# Altium footprint library UCP.PcbLib: 222 footprints (part 13 of 14)
Each footprint in its own frame and in the unit in brackets; x right, y up, seen from the top. Pads: shape width x height; smd on the part's side, far side on the other; paste and mask are expansions set on the pad; w line width, h text height; cw(c..) or ccw(c..) is an arc to the next point about the centre after c.
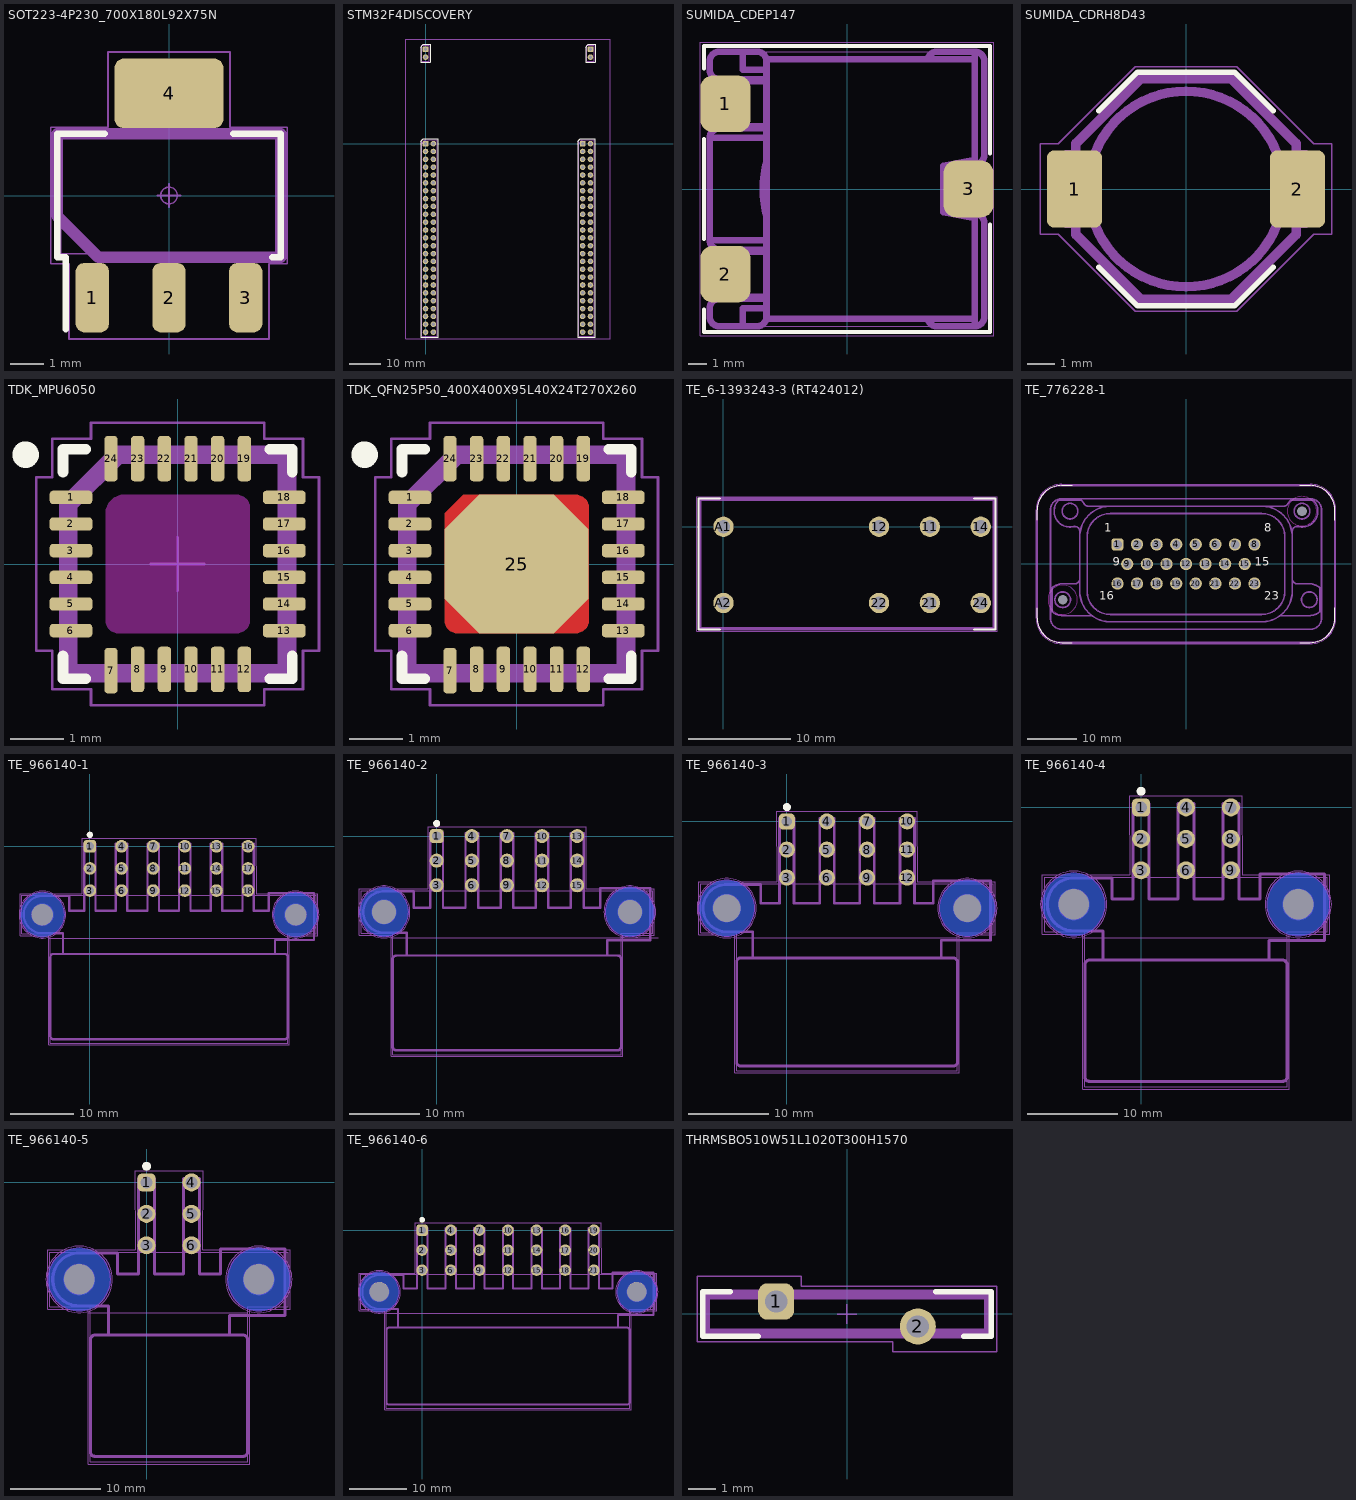
[diagram p12: the footprints below, top view; thin cyan lines are the x and y axes]

## SOT223-4P230_700X180L92X75N [mm] "Small Outline Transistor (SOT223), 2.30 mm pitch; 4 pin, 6.50 mm L X 3.50 mm W X 1.80 mm H body"
height 1.8
pads (4):
  rrect50% 1x2.08 smd: 1(-2.3,-3.065) 2(0,-3.065) 3(2.3,-3.065)
  rrect24% 3.26x2.08 smd: 4(0,3.065)
Top Overlay:
  lines w0.2: -3.1,-4.005 -3.1,-1.85 -3.35,-1.85 -3.35,1.85 -1.93,1.85 ; 1.93,1.85 3.35,1.85 3.35,-1.85 3.1,-1.85
Top Designator:
  text ".Designator" at 0,0 h1.2
Top Assembly:
  lines w0.35: -3.35,-0.617 -3.35,1.85 3.35,1.85 3.35,-1.85 -2.117,-1.85 -3.35,-0.617
Top Courtyard:
  circle w0.05: c0,0 r0.25
  lines w0.05: -0.35,0 0.35,0 ; 0,-0.35 0,0.35 ; -3.55,-2.05 -3,-2.05 -3,-4.305 3,-4.305 3,-2.05 3.55,-2.05 3.55,2.05 1.83,2.05 1.83,4.305 -1.83,4.305 -1.83,2.05 -3.55,2.05 -3.55,-2.05
Top Component Outline:
  lines w0.05: -3.25,-1.75 3.25,-1.75 3.25,1.75 -3.25,1.75 -3.25,-1.75
Top Component Terminal:
  lines w0.05: -2.675,-3.5 -2.675,-2.575 -1.925,-2.575 -1.925,-3.5 -2.675,-3.5 ; -1.5,2.575 -1.5,3.5 1.5,3.5 1.5,2.575 -1.5,2.575 ; -0.375,-3.5 -0.375,-2.575 0.375,-2.575 0.375,-3.5 -0.375,-3.5 ; 1.925,-3.5 1.925,-2.575 2.675,-2.575 2.675,-3.5 1.925,-3.5
3D body "SOT223-4P230_700X180L92X75.STEP": height 1.8, standoff 0, extent -3.25,-3.5 3.25,3.5

## STM32F4DISCOVERY [mm]
pads (104):
  rrect25% 1.8x1.8 hole 1.1 paste-2: JP3.1(0,30.48) JP4.1(53.34,30.48) P1.1(0,0) P2.1(50.8,0)
  round 1.8 hole 1.1 paste-2: JP3.2(0,27.94) JP4.2(53.34,27.94) P1.2(2.54,0) P1.3(0,-2.54) P1.4(2.54,-2.54) P1.5(0,-5.08) P1.6(2.54,-5.08) P1.7(0,-7.62) P1.8(2.54,-7.62) P1.9(0,-10.16) P1.10(2.54,-10.16) P1.11(0,-12.7) P1.12(2.54,-12.7) P1.13(0,-15.24) P1.14(2.54,-15.24) P1.15(0,-17.78) P1.16(2.54,-17.78) P1.17(0,-20.32) P1.18(2.54,-20.32) P1.19(0,-22.86) P1.20(2.54,-22.86) P1.21(0,-25.4) P1.22(2.54,-25.4) P1.23(0,-27.94) P1.24(2.54,-27.94) P1.25(0,-30.48) P1.26(2.54,-30.48) P1.27(0,-33.02) P1.28(2.54,-33.02) P1.29(0,-35.56) P1.30(2.54,-35.56) P1.31(0,-38.1) P1.32(2.54,-38.1) P1.33(0,-40.64) P1.34(2.54,-40.64) P1.35(0,-43.18) P1.36(2.54,-43.18) P1.37(0,-45.72) P1.38(2.54,-45.72) P1.39(0,-48.26) P1.40(2.54,-48.26) P1.41(0,-50.8) P1.42(2.54,-50.8) P1.43(0,-53.34) P1.44(2.54,-53.34) P1.45(0,-55.88) P1.46(2.54,-55.88) P1.47(0,-58.42) P1.48(2.54,-58.42) P1.49(0,-60.96) P1.50(2.54,-60.96) P2.2(53.34,0) P2.3(50.8,-2.54) P2.4(53.34,-2.54) P2.5(50.8,-5.08) P2.6(53.34,-5.08) P2.7(50.8,-7.62) P2.8(53.34,-7.62) P2.9(50.8,-10.16) P2.10(53.34,-10.16) P2.11(50.8,-12.7) P2.12(53.34,-12.7) P2.13(50.8,-15.24) P2.14(53.34,-15.24) P2.15(50.8,-17.78) P2.16(53.34,-17.78) P2.17(50.8,-20.32) P2.18(53.34,-20.32) P2.19(50.8,-22.86) P2.20(53.34,-22.86) P2.21(50.8,-25.4) P2.22(53.34,-25.4) P2.23(50.8,-27.94) P2.24(53.34,-27.94) P2.25(50.8,-30.48) P2.26(53.34,-30.48) P2.27(50.8,-33.02) P2.28(53.34,-33.02) P2.29(50.8,-35.56) P2.30(53.34,-35.56) P2.31(50.8,-38.1) P2.32(53.34,-38.1) P2.33(50.8,-40.64) P2.34(53.34,-40.64) P2.35(50.8,-43.18) P2.36(53.34,-43.18) P2.37(50.8,-45.72) P2.38(53.34,-45.72) P2.39(50.8,-48.26) P2.40(53.34,-48.26) P2.41(50.8,-50.8) P2.42(53.34,-50.8) P2.43(50.8,-53.34) P2.44(53.34,-53.34) P2.45(50.8,-55.88) P2.46(53.34,-55.88) P2.47(50.8,-58.42) P2.48(53.34,-58.42) P2.49(50.8,-60.96) P2.50(53.34,-60.96)
Top Overlay:
  lines w0.2: -1.6,-62.56 4.14,-62.56 4.14,1.6 -0.7,1.6 -1.6,0.7 -1.6,-62.56 ; -1.6,26.34 1.6,26.34 1.6,32.08 -0.7,32.08 -1.6,31.18 -1.6,26.34 ; 49.2,-62.56 54.94,-62.56 54.94,1.6 50.1,1.6 49.2,0.7 49.2,-62.56 ; 51.74,26.34 54.94,26.34 54.94,32.08 52.64,32.08 51.74,31.18 51.74,26.34
Top Designator:
  text ".Designator" at 0,2.54 h1.2
Top Assembly:
  lines w0.35: -6.33,-63.18 -6.33,33.82 59.67,33.82 59.67,-63.18 -6.33,-63.18 ; -1.23,-62.23 -1.23,0 0.04,1.27 3.77,1.27 3.77,-62.23 -1.23,-62.23 ; -1.23,26.67 -1.23,31.75 1.27,31.75 1.27,26.67 -1.23,26.67 ; 49.57,-62.23 54.57,-62.23 54.57,1.27 50.84,1.27 49.57,0 49.57,-62.23 ; 52.11,26.67 52.11,31.75 54.61,31.75 54.61,26.67 52.11,26.67
Top Courtyard:
  circle w0.05: c0,0 r0.25
  lines w0.05: -0.35,0 0.35,0 ; 0,-0.35 0,0.35 ; -6.33,-63.18 59.67,-63.18 59.67,33.82 -6.33,33.82 -6.33,-63.18
Top Component Outline:
  lines w0.05: -1.23,-62.23 -1.23,1.27 3.77,1.27 3.77,-62.23 -1.23,-62.23 ; -1.23,26.67 -1.23,31.75 1.24,31.75 1.24,26.67 -1.23,26.67 ; 49.57,-62.23 49.57,1.27 54.57,1.27 54.57,-62.23 49.57,-62.23 ; 52.11,26.67 52.11,31.75 54.57,31.75 54.57,26.67 52.11,26.67
Top Component Terminal:
  drawing of 416 lines, arcs and shapes, not listed
3D body "STM32F407DISCO.stp": height 14, standoff -3, extent -6.33,-63.18 59.67,33.82

## SUMIDA_CDEP147 [mm]
pads (3):
  rrect50% 2.65x3 smd: 1(-6.425,4.5) 2(-6.425,-4.5) 3(6.425,0.003)
Top Overlay:
  lines w0.2: -7.55,-6.35 -7.55,-7.55 7.55,-7.55 7.55,-1.875 ; -7.55,-2.65 -7.55,2.65 ; -7.55,6.35 -7.55,7.55 7.55,7.55 7.55,1.875
Top Assembly:
  lines w0.35: -6.75,-5.7 -6.75,-5.8 ; -6.75,-3.3 -6.75,-3.2 ; -6.75,3.3 -6.75,3.2 ; -6.75,5.7 -6.75,5.8 ; -4.25,-6.75 cw(c-4.75,-6.75) -4.75,-7.25 -5.5,-7.25 ; -4.25,-6.3 -5.5,-6.3 -5.5,-7.25 ; -4.25,-5.8 -6.75,-5.8 ; -4.25,-5.7 -4.728,-5.7 -5.413,-5.7 -5.735,-5.7 -6.2,-5.7 ; -4.25,-3.3 -4.728,-3.3 -5.413,-3.3 -5.735,-3.3 -6.2,-3.3 ; -4.25,-3.2 -6.75,-3.2 ; -4.25,-2.7 -7.25,-2.7 ; -4.25,2.7 -7.25,2.7 ; -4.25,3.2 -6.75,3.2 ; -4.25,3.3 -4.46,3.3 -5.229,3.3 -5.818,3.3 -6.2,3.3 ; -4.25,5.7 -4.46,5.7 -5.229,5.7 -5.818,5.7 -6.2,5.7 ; -4.25,5.8 -6.75,5.8 ; -4.25,6.3 -5.5,6.3 -5.5,7.25 ; -4.25,6.75 ccw(c-4.75,6.75) -4.75,7.25 -5.5,7.25 ; 4.26,-6.85 ccw(c4.75,-6.75) 4.75,-7.25 6.75,-7.25 ; 4.26,6.85 cw(c4.75,6.75) 4.75,7.25 6.75,7.25 ; 6.75,-1.497 6.75,-1.55 ; 6.75,1.497 6.75,1.55 ; 6.799,-1.302 cw(c6.75,-1.8) 7.25,-1.8 7.25,-6.75 cw(c6.75,-6.75) 6.75,-7.25 ; 6.799,1.302 ccw(c6.75,1.8) 7.25,1.8 7.25,6.75 ccw(c6.75,6.75) 6.75,7.25 ; 6.822,-1.2 7.05,-1.2 7.25,-1.2 7.25,1.2 7.05,1.2 6.822,1.2 ; -7.25,-2.7 ccw(c-6.75,-2.7) -6.75,-3.2 ; -7.25,-2.7 -7.25,2.7 ; -7.25,2.7 cw(c-6.75,2.7) -6.75,3.2 ; -6.75,-5.8 ccw(c-6.75,-6.3) -7.25,-6.3 -7.25,-6.75 ccw(c-6.75,-6.75) -6.75,-7.25 -5.5,-7.25 ; -6.75,5.8 cw(c-6.75,6.3) -7.25,6.3 -7.25,6.75 cw(c-6.75,6.75) -6.75,7.25 -5.5,7.25 ; -6.2,-5.7 -7.05,-5.7 -7.25,-5.7 -7.25,-3.3 -7.05,-3.3 -6.2,-3.3 ; -6.2,-5.7 -6.2,-3.3 ; -6.2,3.3 -6.2,5.7 ; -6.2,3.3 -7.05,3.3 -7.25,3.3 -7.25,5.7 -7.05,5.7 -6.2,5.7 ; -4.25,-1.497 cw(c1.25,0) -4.25,1.497 ; -4.25,-1.497 cw(c1.25,0) -4.25,1.497 ; -4.25,-1.497 cw(c1.25,0) -4.25,1.497 ; -4.25,-1.497 cw(c1.25,0) -4.25,1.497 ; -4.25,-1.497 cw(c1.25,0) -4.25,1.497 ; -4.25,-1.497 cw(c1.25,0) -4.25,1.497 ; -4.25,-1.497 cw(c1.25,0) -4.25,1.497 ; -4.25,-1.497 cw(c1.25,0) -4.25,1.497 ; 6.736,-1.547 ccw(c1.25,0) 6.736,1.547 ; 6.736,-1.547 ccw(c1.25,0) 6.736,1.547 ; 6.736,-1.547 ccw(c1.25,0) 6.736,1.547 ; 6.736,-1.547 ccw(c1.25,0) 6.736,1.547 ; 6.736,-1.547 ccw(c1.25,0) 6.736,1.547 ; 6.736,-1.547 ccw(c1.25,0) 6.736,1.547 ; 6.736,-1.547 ccw(c1.25,0) 6.736,1.547 ; 6.736,-1.547 ccw(c1.25,0) 6.736,1.547 ; 6.736,-1.547 ccw(c1.25,0) 6.736,1.547 ; 6.75,-7.25 6.75,-6.85 ; 6.75,-6.85 6.75,-1.55 ; 6.75,-6.85 -4.25,-6.85 -4.25,6.85 6.75,6.85 ; 6.75,-1.55 5.1,-1.22 5.1,1.22 6.75,1.55 ; 6.75,1.55 6.75,6.85 ; 6.75,6.85 6.75,7.25
Top Courtyard:
  lines w0.05: -7.75,-7.75 -7.75,7.75 7.75,7.75 7.75,-7.75 -7.75,-7.75
Top Component Outline:
  lines w0.025: -7.25,-6.75 ccw(c-6.75,-6.75) -6.75,-7.25 6.75,-7.25 ccw(c6.75,-6.75) 7.25,-6.75 7.25,6.75 ccw(c6.75,6.75) 6.75,7.25 -6.75,7.25 ccw(c-6.75,6.75) -7.25,6.75 ; -7.25,-6.75 -7.25,6.75 ; -7.25,-6.75 -7.25,6.75
3D body "SUMIDA_CDEP147.stp": height 8, standoff 0, extent -7.25,-7.25 7.25,7.25

## SUMIDA_CDRH8D43 [mm]
height 4
pads (2):
  rrect25% 2x2.8 smd: 1(-4.05,0) 2(4.05,0)
Top Overlay:
  lines w0.2: -3.175,-2.836 -1.76,-4.25 1.76,-4.25 3.175,-2.836 ; -3.175,2.836 -1.76,4.25 1.76,4.25 3.175,2.836
Top Assembly:
  circle w0.35: c0,0 r3.554
  lines w0.35: -4.004,-1.25 -4.343,-1.25 -4.343,1.25 -4,1.25 ; 4,1.25 4.343,1.25 4.343,-1.25 4.004,-1.25 ; -4,-1.657 -4,1.657 -1.657,4 1.657,4 4,1.657 4,-1.657 1.657,-4 -1.657,-4 -4,-1.657
Top Courtyard:
  lines w0.05: -5.3,-1.65 -4.643,-1.65 -1.843,-4.45 1.843,-4.45 4.643,-1.65 5.3,-1.65 5.3,1.65 4.643,1.65 1.843,4.45 -1.843,4.45 -4.643,1.65 -5.3,1.65 -5.3,-1.65
Top Component Outline:
  lines w0.025: -4,-1.657 -4,1.657 -1.657,4 1.657,4 4,1.657 4,-1.657 1.657,-4 -1.657,-4 -4,-1.657
Top Component Terminal:
  lines w0.025: -4.343,-1.25 -3.15,-1.25 -3.15,1.25 -4.343,1.25 -4.343,-1.25 ; 3.15,-1.25 4.343,-1.25 4.343,1.25 3.15,1.25 3.15,-1.25
3D body "SUMIDA_CDRH8D43.stp": height 4.5, standoff 0, extent -4.343,-4 4.343,4

## TDK_MPU6050 [mm] "Quad Flat No-Lead (QFN) with Thermal Tab, 0.50 mm pitch;  square, 6 pin X 6 pin, 4.00 mm L X 4.00 mm W X 0.95 mm H body"
height 0.95
pads (24):
  rrect50% 0.8x0.25 smd mask+0.05: 1(-2,1.25) 2(-2,0.75) 3(-2,0.25) 4(-2,-0.25) 5(-2,-0.75) 6(-2,-1.25) 13(2,-1.25) 14(2,-0.75) 15(2,-0.25) 16(2,0.25) 17(2,0.75) 18(2,1.25)
  rrect50% 0.25x0.85 smd mask+0.05: 7(-1.25,-2) 8(-0.75,-1.975) 9(-0.25,-1.975) 10(0.25,-1.975) 11(0.75,-1.975) 12(1.25,-1.975) 19(1.25,1.975) 20(0.75,1.975) 21(0.25,1.975) 22(-0.25,1.975) 23(-0.75,1.975) 24(-1.25,1.975)
Top Overlay:
  circle w0.25: c-2.85,2.05 r0.125
  lines w0.2: -2.15,-1.725 -2.15,-2.15 -1.725,-2.15 ; -2.15,1.725 -2.15,2.15 -1.725,2.15 ; 1.725,-2.15 2.15,-2.15 2.15,-1.725 ; 1.725,2.15 2.15,2.15 2.15,1.725
Keep-Out Layer:
  region: -1,1.3 1.1,1.3 1.15,1.3 1.242,1.262 1.312,1.192 1.35,1.1 1.35,1.05 1.35,-1.05 1.35,-1.1 1.312,-1.192 1.242,-1.262 1.15,-1.3 1.1,-1.3 -1.1,-1.3 -1.15,-1.3 -1.242,-1.262 -1.312,-1.192 -1.35,-1.1 -1.35,-1.05 -1.35,0.95 -1.35,1.02 -1.297,1.148 -1.198,1.247 -1.07,1.3
Top Assembly:
  lines w0.35: -2.05,-2.05 2.05,-2.05 2.05,2.05 -1.125,2.05 -2.05,1.125 -2.05,-2.05
Top Courtyard:
  lines w0.05: -0.5,0 0.5,0 ; 0,-0.5 0,0.5 ; -2.65,-1.625 -2.35,-1.625 -2.35,-2.35 -1.625,-2.35 -1.625,-2.65 1.625,-2.65 1.625,-2.35 2.35,-2.35 2.35,-1.625 2.65,-1.625 2.65,1.625 2.35,1.625 2.35,2.35 1.625,2.35 1.625,2.65 -1.625,2.65 -1.625,2.35 -2.35,2.35 -2.35,1.625 -2.65,1.625 -2.65,-1.625
3D body "QFN50P400X400X95_HS-25N.step": height 0.95, standoff 0, extent -2.051,-2.051 2.051,2.051

## TDK_QFN25P50_400X400X95L40X24T270X260 [mm] "Quad Flat No-Lead (QFN) with Thermal Tab, 0.50 mm pitch;  square, 6 pin X 6 pin, 4.00 mm L X 4.00 mm W X 0.95 mm H body"
height 0.95
pads (25):
  rrect50% 0.8x0.25 smd mask+0.05: 1(-2,1.25) 2(-2,0.75) 3(-2,0.25) 4(-2,-0.25) 5(-2,-0.75) 6(-2,-1.25) 13(2,-1.25) 14(2,-0.75) 15(2,-0.25) 16(2,0.25) 17(2,0.75) 18(2,1.25)
  rrect50% 0.25x0.85 smd mask+0.05: 7(-1.25,-2) 8(-0.75,-1.975) 9(-0.25,-1.975) 10(0.25,-1.975) 11(0.75,-1.975) 12(1.25,-1.975) 19(1.25,1.975) 20(0.75,1.975) 21(0.25,1.975) 22(-0.25,1.975) 23(-0.75,1.975) 24(-1.25,1.975)
  oct 2.7x2.6 smd paste-3 mask+0: 25(0,0)
Top Layer:
  region: -1.35,-1.05 -1.35,0.95 -1,1.3 1.1,1.3 1.15,1.3 1.242,1.262 1.312,1.192 1.35,1.1 1.35,1.05 1.35,-1.05 1.35,-1.1 1.312,-1.192 1.242,-1.262 1.15,-1.3 1.1,-1.3 -1.1,-1.3 -1.15,-1.3 -1.242,-1.262 -1.312,-1.192 -1.35,-1.1
Top Overlay:
  circle w0.25: c-2.85,2.05 r0.125
  lines w0.2: -2.15,-1.725 -2.15,-2.15 -1.725,-2.15 ; -2.15,1.725 -2.15,2.15 -1.725,2.15 ; 1.725,-2.15 2.15,-2.15 2.15,-1.725 ; 1.725,2.15 2.15,2.15 2.15,1.725
Top Assembly:
  lines w0.35: -2.05,-2.05 -2.05,1.125 -1.125,2.05 2.05,2.05 2.05,-2.05 -2.05,-2.05
Top Courtyard:
  lines w0.05: -0.5,0 0.5,0 ; 0,-0.5 0,0.5 ; -2.65,-1.625 -2.65,1.625 -2.35,1.625 -2.35,2.35 -1.625,2.35 -1.625,2.65 1.625,2.65 1.625,2.35 2.35,2.35 2.35,1.625 2.65,1.625 2.65,-1.625 2.35,-1.625 2.35,-2.35 1.625,-2.35 1.625,-2.65 -1.625,-2.65 -1.625,-2.35 -2.35,-2.35 -2.35,-1.625 -2.65,-1.625
3D body "QFN50P400X400X95_HS-25N.step": height 0.95, standoff 0, extent -2.051,-2.051 2.051,2.051

## TE_6-1393243-3 (RT424012) [mm]
pads (8):
  round 2 hole 1.3: 11(20.3,0) 12(15.3,0) 14(25.3,0) 21(20.3,-7.5) 22(15.3,-7.5) 24(25.3,-7.5) A1(0,0) A2(0,-7.5)
Top Overlay:
  lines w0.2: -0.35,-10.125 -2.45,-10.125 -2.45,2.775 -0.35,2.775 ; 24.65,-10.125 26.75,-10.125 26.75,2.775 24.65,2.775
Top Assembly:
  lines w0.35: -2.35,-10.02 -2.35,2.68 26.65,2.68 26.65,-10.02 -2.35,-10.02
Top Courtyard:
  lines w0.05: -2.6,-10.27 -2.6,2.93 26.9,2.93 26.9,-10.27 -2.6,-10.27
Top Component Outline:
  lines w0.025: -2.35,-10.02 26.65,-10.02 26.65,2.68 -2.35,2.68 -2.35,-10.02
Top Component Terminal:
  lines w0.025: -0.25,-8 -0.25,-7 0.25,-7 0.25,-8 -0.25,-8 ; -0.25,-0.5 -0.25,0.5 0.25,0.5 0.25,-0.5 -0.25,-0.5 ; 15.05,-8 15.05,-7 15.55,-7 15.55,-8 15.05,-8 ; 15.05,-0.5 15.05,0.5 15.55,0.5 15.55,-0.5 15.05,-0.5 ; 20.05,-8 20.05,-7 20.55,-7 20.55,-8 20.05,-8 ; 20.05,-0.5 20.05,0.5 20.55,0.5 20.55,-0.5 20.05,-0.5 ; 25.05,-8 25.05,-7 25.55,-7 25.55,-8 25.05,-8 ; 25.05,-0.5 25.05,0.5 25.55,0.5 25.55,-0.5 25.05,-0.5
3D body "TE_6-1393243-3 (RT424012).stp": height 15.8, standoff -3.5, extent -2.35,-10.02 26.65,2.68

## TE_776228-1 [mm]
pads (25):
  rrect50% 2.5x2.5 hole 1.8: 1(-14,4)
  round 2.5 hole 1.8: 2(-10,4) 3(-6,4) 4(-2,4) 5(2,4) 6(6,4) 7(10,4) 8(14,4) 9(-12,0) 10(-8,0) 11(-4,0) 12(0,0) 13(4,0) 14(8,0) 15(12,0) 16(-14,-4) 17(-10,-4) 18(-6,-4) 19(-2,-4) 20(2,-4) 21(6,-4) 22(10,-4) 23(14,-4)
  round 0 hole 2 unplated mask+0.25: MT2(-25.2,-7.3) MT4(23.7,10.8)
Top Layer keep-out:
  circle w0.1: c23.7,10.8 r3
  circle w0.1: c-25.2,-7.3 r3
Top Overlay:
  lines w0.2: -30.4,-8.925 -30.4,-11.05 ccw(c-25.4,-11.05) -25.4,-16.05 -23.275,-16.05 ; -30.4,8.925 -30.4,11.05 cw(c-25.4,11.05) -25.4,16.05 -23.275,16.05 ; 23.275,-16.05 25.4,-16.05 ccw(c25.4,-11.05) 30.4,-11.05 30.4,-8.925 ; 23.275,16.05 25.4,16.05 cw(c25.4,11.05) 30.4,11.05 30.4,8.925
  text "1" at -16.708,6 h3
  text "16" at -17.757,-7.929 h3
  text "23" at 16,-7.929 h3
  text "8" at 16,6 h3
  text "9" at -14.972,-0.965 h3
  text "15" at 14,-0.965 h3
Bottom Overlay:
  text "1" at -16,6 h3
  text "8" at 16.972,6 h3
  text "9" at -14,-0.965 h3
  text "15" at 15.627,-0.965 h3
  text "16" at -16,-7.929 h3
  text "23" at 18.021,-7.929 h3
Top Assembly:
  circle w0.35: c10,-4 r0.65
  circle w0.35: c-4,0 r0.65
  circle w0.35: c-14,-4 r0.65
  circle w0.35: c-6,4 r0.65
  circle w0.35: c-10,4 r0.65
  circle w0.35: c8,0 r0.65
  circle w0.35: c-2,4 r0.65
  circle w0.35: c14,4 r0.65
  circle w0.35: c6,-4 r0.65
  circle w0.35: c-2,-4 r0.65
  circle w0.35: c-14,4 r0.65
  circle w0.35: c4,0 r0.65
  circle w0.35: c10,4 r0.65
  circle w0.35: c14,-4 r0.65
  circle w0.35: c2,4 r0.65
  circle w0.35: c2,-4 r0.65
  circle w0.35: c-10,-4 r0.65
  circle w0.35: c-8,0 r0.65
  circle w0.35: c0,0 r0.65
  circle w0.35: c-12,0 r0.65
  circle w0.35: c6,4 r0.65
  circle w0.35: c12,0 r0.65
  circle w0.35: c-6,-4 r0.65
  circle w0.35: c-23.7,10.8 r1.6
  circle w0.35: c23.7,10.8 r1.6
  circle w0.35: c-25.2,-7.3 r1.6
  circle w0.35: c25.2,-7.3 r1.6
  lines w0.35: -21.7,-3.05 cw(c-22.7,-3.05) -22.7,-4.05 -25.2,-4.05 ccw(c-25.2,-7.3) -27.4,-4.908 -27.4,-9.692 ccw(c-25.2,-7.3) -25.2,-10.55 -19.233,-10.55 ; 19.233,-10.55 25.2,-10.55 ccw(c25.2,-7.3) 27.4,-9.692 27.4,-4.908 ccw(c25.2,-7.3) 25.2,-4.05 22.7,-4.05 cw(c22.7,-3.05) 21.7,-3.05 ; -21.7,5.6 cw(c-15.5,5.6) -15.5,11.8 ; -21.7,5.6 -21.7,-5.6 ccw(c-15.5,-5.6) -15.5,-11.8 15.5,-11.8 ccw(c15.5,-5.6) 21.7,-5.6 21.7,5.6 ; -21.7,5.6 -21.7,6.669 ccw(c-22.7,6.669) -22.935,7.641 cw(c-23.7,10.8) -26.045,13.05 -21.355,13.05 cw(c-23.7,10.8) -20.832,12.329 ccw(c-19.95,12.8) -19.95,11.8 -15.5,11.8 ; -15.5,11.8 -4.5,11.8 -2.7,11.8 2.7,11.8 4.5,11.8 15.5,11.8 ; 15.5,11.8 cw(c15.5,5.6) 21.7,5.6 ; 15.5,11.8 19.95,11.8 ccw(c19.95,12.8) 20.832,12.329 cw(c23.7,10.8) 21.355,13.05 26.045,13.05 cw(c23.7,10.8) 22.935,7.641 ccw(c22.7,6.669) 21.7,6.669 21.7,5.6 ; -30.4,-11.05 ccw(c-25.4,-11.05) -25.4,-16.05 25.4,-16.05 ccw(c25.4,-11.05) 30.4,-11.05 30.4,11.05 ccw(c25.4,11.05) 25.4,16.05 -25.4,16.05 ccw(c-25.4,11.05) -30.4,11.05 -30.4,-11.05 ; -27.7,-11.05 ccw(c-25.4,-11.05) -25.4,-13.35 25.4,-13.35 ccw(c25.4,-11.05) 27.7,-11.05 27.7,11.05 ccw(c25.4,11.05) 25.4,13.35 -25.4,13.35 ccw(c-25.4,11.05) -27.7,11.05 -27.7,-11.05 ; -20.2,-5.6 ccw(c-15.5,-5.6) -15.5,-10.3 15.5,-10.3 ccw(c15.5,-5.6) 20.2,-5.6 20.2,5.6 ccw(c15.5,5.6) 15.5,10.3 -15.5,10.3 ccw(c-15.5,5.6) -20.2,5.6 -20.2,-5.6
  text "1" at -17.389,5.059 h3
  text "23" at 16.089,-7.243 h3
Top Courtyard:
  lines w0.05: -0.5,0 0.5,0 ; 0,-0.5 0,0.5 ; -30.65,-11.05 ccw(c-25.4,-11.05) -25.4,-16.3 25.4,-16.3 ccw(c25.4,-11.05) 30.65,-11.05 30.65,11.05 ccw(c25.4,11.05) 25.4,16.3 -25.4,16.3 ccw(c-25.4,11.05) -30.65,11.05 -30.65,-11.05
Top Component Outline:
  lines w0.025: -30.4,-9.05 -30.4,-11.05 ; -30.4,9.05 -30.4,11.05 ; -23.4,-16.05 -25.4,-16.05 ; -23.4,16.05 -25.4,16.05 ; 23.4,-16.05 25.4,-16.05 ; 23.4,16.05 25.4,16.05 ; 30.4,-9.05 30.4,-11.05 ; 30.4,9.05 30.4,11.05 ; -30.4,-11.05 ccw(c-25.4,-11.05) -25.4,-16.05 ; -30.4,-11.05 ccw(c-25.4,-11.05) -25.4,-16.05 ; -30.4,-11.05 -30.4,11.05 ; -30.4,11.05 cw(c-25.4,11.05) -25.4,16.05 ; -30.4,11.05 cw(c-25.4,11.05) -25.4,16.05 ; -25.4,-16.05 25.4,-16.05 ; -25.4,16.05 25.4,16.05 ; 25.4,-16.05 ccw(c25.4,-11.05) 30.4,-11.05 ; 25.4,-16.05 ccw(c25.4,-11.05) 30.4,-11.05 ; 25.4,16.05 cw(c25.4,11.05) 30.4,11.05 ; 25.4,16.05 cw(c25.4,11.05) 30.4,11.05 ; 30.4,-11.05 30.4,11.05
Top Component Terminal:
  circle w0.025: c10,-4 r0.65
  circle w0.025: c-4,0 r0.65
  circle w0.025: c-14,-4 r0.65
  circle w0.025: c-6,4 r0.65
  circle w0.025: c-10,4 r0.65
  circle w0.025: c8,0 r0.65
  circle w0.025: c-2,4 r0.65
  circle w0.025: c14,4 r0.65
  circle w0.025: c6,-4 r0.65
  circle w0.025: c-2,-4 r0.65
  circle w0.025: c-14,4 r0.65
  circle w0.025: c4,0 r0.65
  circle w0.025: c10,4 r0.65
  circle w0.025: c14,-4 r0.65
  circle w0.025: c2,4 r0.65
  circle w0.025: c2,-4 r0.65
  circle w0.025: c-10,-4 r0.65
  circle w0.025: c-8,0 r0.65
  circle w0.025: c0,0 r0.65
  circle w0.025: c-12,0 r0.65
  circle w0.025: c6,4 r0.65
  circle w0.025: c12,0 r0.65
  circle w0.025: c-6,-4 r0.65
3D body "TE_776228-1.stp": height 34.25, standoff -3.83, extent -30.4,-16.05 30.4,16.05

## TE_966140-1 [mm] "Conn Timer Connector HDR 18 POS 5mm Solder RA Thru-Hole 18 Terminal 1 Port Tray"
height 25.7
pads (20):
  rrect50% 2x2 hole 1.3: 1(0,0)
  round 2 hole 1.3: 2(0,-3.5) 3(0,-7) 4(5,0) 5(5,-3.5) 6(5,-7) 7(10,0) 8(10,-3.5) 9(10,-7) 10(15,0) 11(15,-3.5) 12(15,-7) 13(20,0) 14(20,-3.5) 15(20,-7) 16(25,0) 17(25,-3.5) 18(25,-7)
  round 0 hole 3.4 unplated mask+0.25: MH1(-7.5,-10.8) MH2(32.5,-10.8)
Bottom Layer:
  pour cut-out: 29,-10.8 29,-11.029 29.06,-11.484 29.179,-11.927 29.354,-12.351 29.584,-12.749 29.863,-13.113 30.187,-13.437 30.551,-13.716 30.949,-13.946 31.373,-14.121 31.816,-14.24 32.271,-14.3 32.5,-14.3 32.729,-14.3 33.184,-14.24 33.627,-14.121 34.051,-13.946 34.449,-13.716 34.813,-13.437 35.137,-13.113 35.416,-12.749 35.646,-12.351 35.821,-11.927 35.94,-11.484 36,-11.029 36,-10.8 36,-10.571 35.94,-10.116 35.821,-9.673 35.646,-9.249 35.416,-8.851 35.137,-8.487 34.813,-8.163 34.449,-7.884 34.051,-7.654 33.627,-7.479 33.184,-7.36 32.729,-7.3 32.5,-7.3 32.271,-7.3 31.816,-7.36 31.373,-7.479 30.949,-7.654 30.551,-7.884 30.187,-8.163 29.863,-8.487 29.584,-8.851 29.354,-9.249 29.179,-9.673 29.06,-10.116 29,-10.571
  pour cut-out: -11,-10.8 -11,-11.029 -10.94,-11.484 -10.821,-11.927 -10.646,-12.351 -10.416,-12.749 -10.137,-13.113 -9.813,-13.437 -9.449,-13.716 -9.051,-13.946 -8.627,-14.121 -8.184,-14.24 -7.729,-14.3 -7.5,-14.3 -7.271,-14.3 -6.816,-14.24 -6.373,-14.121 -5.949,-13.946 -5.551,-13.716 -5.187,-13.437 -4.863,-13.113 -4.584,-12.749 -4.354,-12.351 -4.179,-11.927 -4.06,-11.484 -4,-11.029 -4,-10.8 -4,-10.571 -4.06,-10.116 -4.179,-9.673 -4.354,-9.249 -4.584,-8.851 -4.863,-8.487 -5.187,-8.163 -5.551,-7.884 -5.949,-7.654 -6.373,-7.479 -6.816,-7.36 -7.271,-7.3 -7.5,-7.3 -7.729,-7.3 -8.184,-7.36 -8.627,-7.479 -9.051,-7.654 -9.449,-7.884 -9.813,-8.163 -10.137,-8.487 -10.416,-8.851 -10.646,-9.249 -10.821,-9.673 -10.94,-10.116 -11,-10.571
Bottom Layer keep-out:
  circle w0.025: c32.5,-10.8 r3.5
  circle w0.025: c-7.5,-10.8 r3.5
Top Overlay:
  circle w0.5: c0,1.8 r0.25
Top Designator:
  text ".Designator" at -4.511,-0.453 h2
Top Assembly:
  circle w0.35: c-7.5,-10.8 r1.6
  circle w0.35: c32.5,-10.8 r1.6
  lines w0.35: -4.25,-17 29.25,-17 ; -4.25,-17 -5.75,-17 ccw(c-5.75,-17.5) -6.25,-17.5 -6.25,-30 ccw(c-5.75,-30) -5.75,-30.5 5.75,-30.5 19.25,-30.5 30.75,-30.5 ccw(c30.75,-30) 31.25,-30 31.25,-17.5 ccw(c30.75,-17.5) 31.212,-17.309 ccw(c30.75,-17.5) 30.75,-17 29.25,-17 ; -4.25,-17 -4.25,-13.75 -7.5,-13.75 cw(c-7.5,-10.8) -8.615,-13.531 cw(c-7.5,-10.8) -8.615,-8.069 cw(c-7.5,-10.8) -7.5,-7.85 -4.25,-7.85 -3.25,-7.85 -3.25,-10.2 -0.9,-10.2 -0.9,-1.9 -0.9,0.4 0.9,0.4 0.9,-1.9 0.9,-10.2 4.1,-10.2 4.1,-1.9 4.1,0.4 5.9,0.4 5.9,-1.9 5.9,-10.2 9.1,-10.2 9.1,-1.9 9.1,0.4 10.9,0.4 10.9,-1.9 10.9,-10.2 14.1,-10.2 14.1,-1.9 14.1,0.4 15.9,0.4 15.9,-1.9 15.9,-10.2 19.1,-10.2 19.1,-1.9 19.1,0.4 20.9,0.4 20.9,-1.9 20.9,-10.2 24.1,-10.2 24.1,-1.9 24.1,0.4 25.9,0.4 25.9,-1.9 25.9,-10.2 28.25,-10.2 28.25,-7.4 29.25,-7.4 35.4,-7.4 35.4,-14.8 29.25,-14.8 29.25,-17
Top Courtyard:
  lines w0.025: -6.5,-14.5 31.5,-14.5
  lines w0.05: -11,-14.1 -6.5,-14.1 -6.5,-31.35 31.5,-31.35 31.5,-14.1 36,-14.1 36,-7.5 26.25,-7.5 26.2,1.3 -1.3,1.3 -1.25,-7.5 -11,-7.5 -11,-14.1
Bottom Courtyard:
  circle w0.05: c32.5,-10.8 r3.7
  circle w0.05: c-7.5,-10.8 r3.7
Top Component Outline:
  lines w0.05: -10.75,-13.85 -10.75,-7.75 35.75,-7.75 35.75,-13.85 31.25,-13.85 31.25,-31.1 -6.25,-31.1 -6.25,-13.85 -10.75,-13.85
Top Component Terminal:
  lines w0.025: -0.4,-7.4 -0.4,-6.6 ; -0.4,-7.4 0.4,-7.4 ; -0.4,-7.4 -0.4,-6.6 ; -0.4,-7.4 0.4,-7.4 ; -0.4,-6.6 0.4,-6.6 ; -0.4,-6.6 0.4,-6.6 ; -0.4,-3.9 -0.4,-3.1 ; -0.4,-3.9 0.4,-3.9 ; -0.4,-3.9 -0.4,-3.1 ; -0.4,-3.9 0.4,-3.9 ; -0.4,-3.1 0.4,-3.1 ; -0.4,-3.1 0.4,-3.1 ; -0.4,-0.4 -0.4,0.4 ; -0.4,-0.4 0.4,-0.4 ; -0.4,-0.4 -0.4,0.4 ; -0.4,-0.4 0.4,-0.4 ; -0.4,-0.4 -0.4,0.4 ; -0.4,-0.4 0.4,-0.4 ; -0.4,-0.4 -0.4,0.4 ; -0.4,-0.4 0.4,-0.4 ; -0.4,0.4 0.4,0.4 ; -0.4,0.4 0.4,0.4 ; -0.4,0.4 0.4,0.4 ; -0.4,0.4 0.4,0.4 ; 0.4,-7.4 0.4,-6.6 ; 0.4,-7.4 0.4,-6.6 ; 0.4,-3.9 0.4,-3.1 ; 0.4,-3.9 0.4,-3.1 ; 0.4,-0.4 0.4,0.4 ; 0.4,-0.4 0.4,0.4 ; 0.4,-0.4 0.4,0.4 ; 0.4,-0.4 0.4,0.4 ; 4.6,-0.4 4.6,0.4 ; 4.6,-0.4 5.4,-0.4 ; 4.6,-0.4 4.6,0.4 ; 4.6,-0.4 5.4,-0.4 ; 4.6,0.4 5.4,0.4 ; 4.6,0.4 5.4,0.4 ; 5.4,-0.4 5.4,0.4 ; 5.4,-0.4 5.4,0.4 ; 9.6,-0.4 9.6,0.4 ; 9.6,-0.4 10.4,-0.4 ; 9.6,-0.4 9.6,0.4 ; 9.6,-0.4 10.4,-0.4 ; 9.6,0.4 10.4,0.4 ; 9.6,0.4 10.4,0.4 ; 10.4,-0.4 10.4,0.4 ; 10.4,-0.4 10.4,0.4 ; 14.6,-0.4 14.6,0.4 ; 14.6,-0.4 15.4,-0.4 ; 14.6,-0.4 14.6,0.4 ; 14.6,-0.4 15.4,-0.4 ; 14.6,0.4 15.4,0.4 ; 14.6,0.4 15.4,0.4 ; 15.4,-0.4 15.4,0.4 ; 15.4,-0.4 15.4,0.4 ; 19.6,-0.4 19.6,0.4 ; 19.6,-0.4 20.4,-0.4 ; 19.6,-0.4 19.6,0.4 ; 19.6,-0.4 20.4,-0.4 ; 19.6,0.4 20.4,0.4 ; 19.6,0.4 20.4,0.4 ; 20.4,-0.4 20.4,0.4 ; 20.4,-0.4 20.4,0.4 ; 24.6,-0.4 24.6,0.4 ; 24.6,-0.4 25.4,-0.4 ; 24.6,-0.4 24.6,0.4 ; 24.6,-0.4 25.4,-0.4 ; 24.6,0.4 25.4,0.4 ; 24.6,0.4 25.4,0.4 ; 25.4,-0.4 25.4,0.4 ; 25.4,-0.4 25.4,0.4 ; 4.6,-7.4 4.6,-6.6 5.4,-6.6 5.4,-7.4 4.6,-7.4 ; 4.6,-3.9 4.6,-3.1 5.4,-3.1 5.4,-3.9 4.6,-3.9 ; 9.6,-7.4 9.6,-6.6 10.4,-6.6 10.4,-7.4 9.6,-7.4 ; 9.6,-3.9 9.6,-3.1 10.4,-3.1 10.4,-3.9 9.6,-3.9 ; 14.6,-7.4 14.6,-6.6 15.4,-6.6 15.4,-7.4 14.6,-7.4 ; 14.6,-3.9 14.6,-3.1 15.4,-3.1 15.4,-3.9 14.6,-3.9 ; 19.6,-7.4 19.6,-6.6 20.4,-6.6 20.4,-7.4 19.6,-7.4 ; 19.6,-3.9 19.6,-3.1 20.4,-3.1 20.4,-3.9 19.6,-3.9 ; 24.6,-7.4 24.6,-6.6 25.4,-6.6 25.4,-7.4 24.6,-7.4 ; 24.6,-3.9 24.6,-3.1 25.4,-3.1 25.4,-3.9 24.6,-3.9
3D body "966140-1.stp": height 25.7, standoff -3, extent -10.45,-30.5 35.4,0.4

## TE_966140-2 [mm] "Conn Timer Connector HDR 15 POS 5mm Solder RA Thru-Hole 15 Terminal 1 Port Tray"
height 25.7
pads (17):
  rrect50% 2x2 hole 1.3: 1(0,0)
  round 2 hole 1.3: 2(0,-3.5) 3(0,-7) 4(5,0) 5(5,-3.5) 6(5,-7) 7(10,0) 8(10,-3.5) 9(10,-7) 10(15,0) 11(15,-3.5) 12(15,-7) 13(20,0) 14(20,-3.5) 15(20,-7)
  round 0 hole 3.4 unplated mask+0.25: MH1(-7.5,-10.8) MH2(27.5,-10.8)
Bottom Layer:
  pour cut-out: -11,-10.8 -11,-11.029 -10.94,-11.484 -10.821,-11.927 -10.646,-12.351 -10.416,-12.749 -10.137,-13.113 -9.813,-13.437 -9.449,-13.716 -9.051,-13.946 -8.627,-14.121 -8.184,-14.24 -7.729,-14.3 -7.5,-14.3 -7.271,-14.3 -6.816,-14.24 -6.373,-14.121 -5.949,-13.946 -5.551,-13.716 -5.187,-13.437 -4.863,-13.113 -4.584,-12.749 -4.354,-12.351 -4.179,-11.927 -4.06,-11.484 -4,-11.029 -4,-10.8 -4,-10.571 -4.06,-10.116 -4.179,-9.673 -4.354,-9.249 -4.584,-8.851 -4.863,-8.487 -5.187,-8.163 -5.551,-7.884 -5.949,-7.654 -6.373,-7.479 -6.816,-7.36 -7.271,-7.3 -7.5,-7.3 -7.729,-7.3 -8.184,-7.36 -8.627,-7.479 -9.051,-7.654 -9.449,-7.884 -9.813,-8.163 -10.137,-8.487 -10.416,-8.851 -10.646,-9.249 -10.821,-9.673 -10.94,-10.116 -11,-10.571
  pour cut-out: 24,-10.8 24,-11.029 24.06,-11.484 24.179,-11.927 24.354,-12.351 24.584,-12.749 24.863,-13.113 25.187,-13.437 25.551,-13.716 25.949,-13.946 26.373,-14.121 26.816,-14.24 27.271,-14.3 27.5,-14.3 27.729,-14.3 28.184,-14.24 28.627,-14.121 29.051,-13.946 29.449,-13.716 29.813,-13.437 30.137,-13.113 30.416,-12.749 30.646,-12.351 30.821,-11.927 30.94,-11.484 31,-11.029 31,-10.8 31,-10.571 30.94,-10.116 30.821,-9.673 30.646,-9.249 30.416,-8.851 30.137,-8.487 29.813,-8.163 29.449,-7.884 29.051,-7.654 28.627,-7.479 28.184,-7.36 27.729,-7.3 27.5,-7.3 27.271,-7.3 26.816,-7.36 26.373,-7.479 25.949,-7.654 25.551,-7.884 25.187,-8.163 24.863,-8.487 24.584,-8.851 24.354,-9.249 24.179,-9.673 24.06,-10.116 24,-10.571
Bottom Layer keep-out:
  circle w0.025: c-7.5,-10.8 r3.5
  circle w0.025: c27.5,-10.8 r3.5
Top Overlay:
  circle w0.5: c0,1.8 r0.25
Top Designator:
  text ".Designator" at -4.511,-0.453 h2
Top Assembly:
  circle w0.35: c-7.5,-10.8 r1.6
  circle w0.35: c27.5,-10.8 r1.6
  lines w0.35: -4.25,-17 -4.25,-13.75 -7.5,-13.75 cw(c-7.5,-10.8) -8.615,-13.531 cw(c-7.5,-10.8) -8.615,-8.069 cw(c-7.5,-10.8) -7.5,-7.85 -4.25,-7.85 -3.25,-7.85 -3.25,-10.2 -0.9,-10.2 -0.9,-1.9 -0.9,0.4 0.9,0.4 0.9,-1.9 0.9,-10.2 4.1,-10.2 4.1,-1.9 4.1,0.4 5.9,0.4 5.9,-1.9 5.9,-10.2 9.1,-10.2 9.1,-1.9 9.1,0.4 10.9,0.4 10.9,-1.9 10.9,-10.2 14.1,-10.2 14.1,-1.9 14.1,0.4 15.9,0.4 15.9,-1.9 15.9,-10.2 19.1,-10.2 19.1,-1.9 19.1,0.4 20.9,0.4 20.9,-1.9 20.9,-10.2 23.25,-10.2 23.25,-7.4 24.25,-7.4 30.4,-7.4 30.4,-14.8 24.25,-14.8 24.25,-17 ; -4.25,-17 -5.75,-17 ccw(c-5.75,-17.5) -6.25,-17.5 -6.25,-30 ccw(c-5.75,-30) -5.75,-30.5 5.75,-30.5 19.25,-30.5 25.75,-30.5 ccw(c25.75,-30) 26.25,-30 26.25,-17.5 ccw(c25.75,-17.5) 26.212,-17.309 ccw(c25.75,-17.5) 25.75,-17 24.25,-17 ; -4.25,-17 24.25,-17
Top Courtyard:
  lines w0.025: -6.5,-14.5 31.5,-14.5
  lines w0.05: -11,-14.1 -11,-7.5 -1.25,-7.5 -1.3,1.3 21.2,1.3 21.25,-7.5 31,-7.5 31,-14.1 26.5,-14.1 26.5,-31.35 -6.5,-31.35 -6.5,-14.1 -11,-14.1
Bottom Courtyard:
  circle w0.05: c-7.5,-10.8 r3.7
  circle w0.05: c27.5,-10.8 r3.7
Top Component Outline:
  lines w0.05: -10.75,-13.85 -6.25,-13.85 -6.25,-31.1 26.25,-31.1 26.25,-13.85 30.75,-13.85 30.75,-7.75 -10.75,-7.75 -10.75,-13.85
Top Component Terminal:
  lines w0.025: -0.4,-7.4 0.4,-7.4 ; -0.4,-7.4 -0.4,-6.6 ; -0.4,-7.4 0.4,-7.4 ; -0.4,-7.4 -0.4,-6.6 ; -0.4,-6.6 0.4,-6.6 ; -0.4,-6.6 0.4,-6.6 ; -0.4,-3.9 0.4,-3.9 ; -0.4,-3.9 -0.4,-3.1 ; -0.4,-3.9 0.4,-3.9 ; -0.4,-3.9 -0.4,-3.1 ; -0.4,-3.1 0.4,-3.1 ; -0.4,-3.1 0.4,-3.1 ; -0.4,-0.4 0.4,-0.4 ; -0.4,-0.4 -0.4,0.4 ; -0.4,-0.4 0.4,-0.4 ; -0.4,-0.4 -0.4,0.4 ; -0.4,-0.4 0.4,-0.4 ; -0.4,-0.4 -0.4,0.4 ; -0.4,-0.4 0.4,-0.4 ; -0.4,-0.4 -0.4,0.4 ; -0.4,0.4 0.4,0.4 ; -0.4,0.4 0.4,0.4 ; -0.4,0.4 0.4,0.4 ; -0.4,0.4 0.4,0.4 ; 0.4,-7.4 0.4,-6.6 ; 0.4,-7.4 0.4,-6.6 ; 0.4,-3.9 0.4,-3.1 ; 0.4,-3.9 0.4,-3.1 ; 0.4,-0.4 0.4,0.4 ; 0.4,-0.4 0.4,0.4 ; 0.4,-0.4 0.4,0.4 ; 0.4,-0.4 0.4,0.4 ; 4.6,-0.4 5.4,-0.4 ; 4.6,-0.4 4.6,0.4 ; 4.6,-0.4 5.4,-0.4 ; 4.6,-0.4 4.6,0.4 ; 4.6,0.4 5.4,0.4 ; 4.6,0.4 5.4,0.4 ; 5.4,-0.4 5.4,0.4 ; 5.4,-0.4 5.4,0.4 ; 9.6,-0.4 10.4,-0.4 ; 9.6,-0.4 9.6,0.4 ; 9.6,-0.4 10.4,-0.4 ; 9.6,-0.4 9.6,0.4 ; 9.6,0.4 10.4,0.4 ; 9.6,0.4 10.4,0.4 ; 10.4,-0.4 10.4,0.4 ; 10.4,-0.4 10.4,0.4 ; 14.6,-0.4 15.4,-0.4 ; 14.6,-0.4 14.6,0.4 ; 14.6,-0.4 15.4,-0.4 ; 14.6,-0.4 14.6,0.4 ; 14.6,0.4 15.4,0.4 ; 14.6,0.4 15.4,0.4 ; 15.4,-0.4 15.4,0.4 ; 15.4,-0.4 15.4,0.4 ; 19.6,-7.4 20.4,-7.4 ; 19.6,-7.4 19.6,-6.6 ; 19.6,-7.4 20.4,-7.4 ; 19.6,-7.4 19.6,-6.6 ; 19.6,-6.6 20.4,-6.6 ; 19.6,-6.6 20.4,-6.6 ; 19.6,-3.9 20.4,-3.9 ; 19.6,-3.9 19.6,-3.1 ; 19.6,-3.9 20.4,-3.9 ; 19.6,-3.9 19.6,-3.1 ; 19.6,-3.1 20.4,-3.1 ; 19.6,-3.1 20.4,-3.1 ; 19.6,-0.4 20.4,-0.4 ; 19.6,-0.4 19.6,0.4 ; 19.6,-0.4 20.4,-0.4 ; 19.6,-0.4 19.6,0.4 ; 19.6,-0.4 20.4,-0.4 ; 19.6,-0.4 19.6,0.4 ; 19.6,-0.4 20.4,-0.4 ; 19.6,-0.4 19.6,0.4 ; 19.6,0.4 20.4,0.4 ; 19.6,0.4 20.4,0.4 ; 19.6,0.4 20.4,0.4 ; 19.6,0.4 20.4,0.4 ; 20.4,-7.4 20.4,-6.6 ; 20.4,-7.4 20.4,-6.6 ; 20.4,-3.9 20.4,-3.1 ; 20.4,-3.9 20.4,-3.1 ; 20.4,-0.4 20.4,0.4 ; 20.4,-0.4 20.4,0.4 ; 20.4,-0.4 20.4,0.4 ; 20.4,-0.4 20.4,0.4 ; 4.6,-7.4 5.4,-7.4 5.4,-6.6 4.6,-6.6 4.6,-7.4 ; 4.6,-3.9 5.4,-3.9 5.4,-3.1 4.6,-3.1 4.6,-3.9 ; 9.6,-7.4 10.4,-7.4 10.4,-6.6 9.6,-6.6 9.6,-7.4 ; 9.6,-3.9 10.4,-3.9 10.4,-3.1 9.6,-3.1 9.6,-3.9 ; 14.6,-7.4 15.4,-7.4 15.4,-6.6 14.6,-6.6 14.6,-7.4 ; 14.6,-3.9 15.4,-3.9 15.4,-3.1 14.6,-3.1 14.6,-3.9
3D body "TE_966140-2.stp": height 25.7, standoff -3, extent -10.45,-30.5 30.4,0.4

## TE_966140-3 [mm] "Conn Timer Connector HDR 12 POS 5mm Solder RA Thru-Hole 12 Terminal 1 Port Tray"
height 25.7
pads (14):
  rrect50% 2x2 hole 1.3: 1(0,0)
  round 2 hole 1.3: 2(0,-3.5) 3(0,-7) 4(5,0) 5(5,-3.5) 6(5,-7) 7(10,0) 8(10,-3.5) 9(10,-7) 10(15,0) 11(15,-3.5) 12(15,-7)
  round 0 hole 3.4 unplated mask+0.25: MH1(-7.5,-10.8) MH2(22.5,-10.8)
Bottom Layer:
  pour cut-out: -11,-10.8 -11,-11.029 -10.94,-11.484 -10.821,-11.927 -10.646,-12.351 -10.416,-12.749 -10.137,-13.113 -9.813,-13.437 -9.449,-13.716 -9.051,-13.946 -8.627,-14.121 -8.184,-14.24 -7.729,-14.3 -7.5,-14.3 -7.271,-14.3 -6.816,-14.24 -6.373,-14.121 -5.949,-13.946 -5.551,-13.716 -5.187,-13.437 -4.863,-13.113 -4.584,-12.749 -4.354,-12.351 -4.179,-11.927 -4.06,-11.484 -4,-11.029 -4,-10.8 -4,-10.571 -4.06,-10.116 -4.179,-9.673 -4.354,-9.249 -4.584,-8.851 -4.863,-8.487 -5.187,-8.163 -5.551,-7.884 -5.949,-7.654 -6.373,-7.479 -6.816,-7.36 -7.271,-7.3 -7.5,-7.3 -7.729,-7.3 -8.184,-7.36 -8.627,-7.479 -9.051,-7.654 -9.449,-7.884 -9.813,-8.163 -10.137,-8.487 -10.416,-8.851 -10.646,-9.249 -10.821,-9.673 -10.94,-10.116 -11,-10.571
  pour cut-out: 19,-10.8 19,-11.029 19.06,-11.484 19.179,-11.927 19.354,-12.351 19.584,-12.749 19.863,-13.113 20.187,-13.437 20.551,-13.716 20.949,-13.946 21.373,-14.121 21.816,-14.24 22.271,-14.3 22.5,-14.3 22.729,-14.3 23.184,-14.24 23.627,-14.121 24.051,-13.946 24.449,-13.716 24.813,-13.437 25.137,-13.113 25.416,-12.749 25.646,-12.351 25.821,-11.927 25.94,-11.484 26,-11.029 26,-10.8 26,-10.571 25.94,-10.116 25.821,-9.673 25.646,-9.249 25.416,-8.851 25.137,-8.487 24.813,-8.163 24.449,-7.884 24.051,-7.654 23.627,-7.479 23.184,-7.36 22.729,-7.3 22.5,-7.3 22.271,-7.3 21.816,-7.36 21.373,-7.479 20.949,-7.654 20.551,-7.884 20.187,-8.163 19.863,-8.487 19.584,-8.851 19.354,-9.249 19.179,-9.673 19.06,-10.116 19,-10.571
Bottom Layer keep-out:
  circle w0.025: c-7.5,-10.8 r3.5
  circle w0.025: c22.5,-10.8 r3.5
Top Overlay:
  circle w0.5: c0,1.8 r0.25
Top Designator:
  text ".Designator" at -4.511,-0.453 h2
Top Assembly:
  circle w0.35: c-7.5,-10.8 r1.6
  circle w0.35: c22.5,-10.8 r1.6
  lines w0.35: 14.25,-30.5 20.75,-30.5 ccw(c20.75,-30) 21.25,-30 21.25,-17.5 ccw(c20.75,-17.5) 21.212,-17.309 ccw(c20.75,-17.5) 20.75,-17 19.25,-17 ; 19.25,-30.5 5.75,-30.5 -5.75,-30.5 cw(c-5.75,-30) -6.25,-30 -6.25,-17.5 cw(c-5.75,-17.5) -5.75,-17 -4.25,-17 ; -4.25,-17 -4.25,-13.75 -7.5,-13.75 cw(c-7.5,-10.8) -8.615,-13.531 cw(c-7.5,-10.8) -8.615,-8.069 cw(c-7.5,-10.8) -7.5,-7.85 -4.25,-7.85 -3.25,-7.85 -3.25,-10.2 -0.9,-10.2 -0.9,-1.9 -0.9,0.4 0.9,0.4 0.9,-1.9 0.9,-10.2 4.1,-10.2 4.1,-1.9 4.1,0.4 5.9,0.4 5.9,-1.9 5.9,-10.2 9.1,-10.2 9.1,-1.9 9.1,0.4 10.9,0.4 10.9,-1.9 10.9,-10.2 14.1,-10.2 14.1,-1.9 14.1,0.4 15.9,0.4 15.9,-1.9 15.9,-10.2 18.25,-10.2 18.25,-7.4 19.25,-7.4 25.4,-7.4 25.4,-14.8 19.25,-14.8 19.25,-17 ; -4.25,-17 19.25,-17
Top Courtyard:
  lines w0.025: -6.5,-14.5 21.25,-14.5
  lines w0.05: -11,-14.1 -11,-7.5 -1.25,-7.5 -1.3,1.3 16.2,1.3 16.25,-7.5 26,-7.5 26,-14.1 21.5,-14.1 21.5,-31.35 -6.5,-31.35 -6.5,-14.1 -11,-14.1
Bottom Courtyard:
  circle w0.05: c-7.5,-10.8 r3.7
  circle w0.05: c22.5,-10.8 r3.7
Top Component Outline:
  lines w0.05: -10.75,-13.85 -6.25,-13.85 -6.25,-31.1 21.25,-31.1 21.25,-13.85 25.75,-13.85 25.75,-7.75 -10.75,-7.75 -10.75,-13.85
Top Component Terminal:
  lines w0.025: -0.4,-7.4 0.4,-7.4 ; -0.4,-7.4 -0.4,-6.6 ; -0.4,-7.4 0.4,-7.4 ; -0.4,-7.4 -0.4,-6.6 ; -0.4,-6.6 0.4,-6.6 ; -0.4,-6.6 0.4,-6.6 ; -0.4,-3.9 0.4,-3.9 ; -0.4,-3.9 -0.4,-3.1 ; -0.4,-3.9 0.4,-3.9 ; -0.4,-3.9 -0.4,-3.1 ; -0.4,-3.1 0.4,-3.1 ; -0.4,-3.1 0.4,-3.1 ; -0.4,-0.4 0.4,-0.4 ; -0.4,-0.4 -0.4,0.4 ; -0.4,-0.4 0.4,-0.4 ; -0.4,-0.4 -0.4,0.4 ; -0.4,-0.4 0.4,-0.4 ; -0.4,-0.4 -0.4,0.4 ; -0.4,-0.4 0.4,-0.4 ; -0.4,-0.4 -0.4,0.4 ; -0.4,0.4 0.4,0.4 ; -0.4,0.4 0.4,0.4 ; -0.4,0.4 0.4,0.4 ; -0.4,0.4 0.4,0.4 ; 0.4,-7.4 0.4,-6.6 ; 0.4,-7.4 0.4,-6.6 ; 0.4,-3.9 0.4,-3.1 ; 0.4,-3.9 0.4,-3.1 ; 0.4,-0.4 0.4,0.4 ; 0.4,-0.4 0.4,0.4 ; 0.4,-0.4 0.4,0.4 ; 0.4,-0.4 0.4,0.4 ; 4.6,-0.4 5.4,-0.4 ; 4.6,-0.4 4.6,0.4 ; 4.6,-0.4 5.4,-0.4 ; 4.6,-0.4 4.6,0.4 ; 4.6,0.4 5.4,0.4 ; 4.6,0.4 5.4,0.4 ; 5.4,-0.4 5.4,0.4 ; 5.4,-0.4 5.4,0.4 ; 9.6,-0.4 10.4,-0.4 ; 9.6,-0.4 9.6,0.4 ; 9.6,-0.4 10.4,-0.4 ; 9.6,-0.4 9.6,0.4 ; 9.6,0.4 10.4,0.4 ; 9.6,0.4 10.4,0.4 ; 10.4,-0.4 10.4,0.4 ; 10.4,-0.4 10.4,0.4 ; 14.6,-0.4 15.4,-0.4 ; 14.6,-0.4 14.6,0.4 ; 14.6,-0.4 15.4,-0.4 ; 14.6,-0.4 14.6,0.4 ; 14.6,0.4 15.4,0.4 ; 14.6,0.4 15.4,0.4 ; 15.4,-0.4 15.4,0.4 ; 15.4,-0.4 15.4,0.4 ; 4.6,-7.4 5.4,-7.4 5.4,-6.6 4.6,-6.6 4.6,-7.4 ; 4.6,-3.9 5.4,-3.9 5.4,-3.1 4.6,-3.1 4.6,-3.9 ; 9.6,-7.4 10.4,-7.4 10.4,-6.6 9.6,-6.6 9.6,-7.4 ; 9.6,-3.9 10.4,-3.9 10.4,-3.1 9.6,-3.1 9.6,-3.9 ; 14.6,-7.4 15.4,-7.4 15.4,-6.6 14.6,-6.6 14.6,-7.4 ; 14.6,-3.9 15.4,-3.9 15.4,-3.1 14.6,-3.1 14.6,-3.9
3D body "TE_966140-3.stp": height 25.7, standoff -3, extent -10.45,-30.5 25.4,0.4

## TE_966140-4 [mm] "Conn Timer Connector HDR 9 POS 5mm Solder RA Thru-Hole 9 Terminal 1 Port Tray"
height 25.7
pads (11):
  rrect50% 2x2 hole 1.3: 1(0,0)
  round 2 hole 1.3: 2(0,-3.5) 3(0,-7) 4(5,0) 5(5,-3.5) 6(5,-7) 7(10,0) 8(10,-3.5) 9(10,-7)
  round 0 hole 3.4 unplated mask+0.25: MH1(-7.5,-10.8) MH2(17.5,-10.8)
Bottom Layer:
  pour cut-out: 14,-10.8 14,-11.029 14.06,-11.484 14.179,-11.927 14.354,-12.351 14.584,-12.749 14.863,-13.113 15.187,-13.437 15.551,-13.716 15.949,-13.946 16.373,-14.121 16.816,-14.24 17.271,-14.3 17.5,-14.3 17.729,-14.3 18.184,-14.24 18.627,-14.121 19.051,-13.946 19.449,-13.716 19.813,-13.437 20.137,-13.113 20.416,-12.749 20.646,-12.351 20.821,-11.927 20.94,-11.484 21,-11.029 21,-10.8 21,-10.571 20.94,-10.116 20.821,-9.673 20.646,-9.249 20.416,-8.851 20.137,-8.487 19.813,-8.163 19.449,-7.884 19.051,-7.654 18.627,-7.479 18.184,-7.36 17.729,-7.3 17.5,-7.3 17.271,-7.3 16.816,-7.36 16.373,-7.479 15.949,-7.654 15.551,-7.884 15.187,-8.163 14.863,-8.487 14.584,-8.851 14.354,-9.249 14.179,-9.673 14.06,-10.116 14,-10.571
  pour cut-out: -11,-10.8 -11,-11.029 -10.94,-11.484 -10.821,-11.927 -10.646,-12.351 -10.416,-12.749 -10.137,-13.113 -9.813,-13.437 -9.449,-13.716 -9.051,-13.946 -8.627,-14.121 -8.184,-14.24 -7.729,-14.3 -7.5,-14.3 -7.271,-14.3 -6.816,-14.24 -6.373,-14.121 -5.949,-13.946 -5.551,-13.716 -5.187,-13.437 -4.863,-13.113 -4.584,-12.749 -4.354,-12.351 -4.179,-11.927 -4.06,-11.484 -4,-11.029 -4,-10.8 -4,-10.571 -4.06,-10.116 -4.179,-9.673 -4.354,-9.249 -4.584,-8.851 -4.863,-8.487 -5.187,-8.163 -5.551,-7.884 -5.949,-7.654 -6.373,-7.479 -6.816,-7.36 -7.271,-7.3 -7.5,-7.3 -7.729,-7.3 -8.184,-7.36 -8.627,-7.479 -9.051,-7.654 -9.449,-7.884 -9.813,-8.163 -10.137,-8.487 -10.416,-8.851 -10.646,-9.249 -10.821,-9.673 -10.94,-10.116 -11,-10.571
Bottom Layer keep-out:
  circle w0.025: c17.5,-10.8 r3.5
  circle w0.025: c-7.5,-10.8 r3.5
Top Overlay:
  circle w0.5: c0,1.8 r0.25
Top Designator:
  text ".Designator" at -4.511,-0.453 h2
Top Assembly:
  circle w0.35: c17.5,-10.8 r1.6
  circle w0.35: c-7.5,-10.8 r1.6
  lines w0.35: -4.25,-17 14.25,-17 ; -4.25,-17 -4.25,-13.75 -7.5,-13.75 cw(c-7.5,-10.8) -8.615,-13.531 cw(c-7.5,-10.8) -8.615,-8.069 cw(c-7.5,-10.8) -7.5,-7.85 -4.25,-7.85 -3.25,-7.85 -3.25,-10.2 -0.9,-10.2 -0.9,-1.9 -0.9,0.4 0.9,0.4 0.9,-1.9 0.9,-10.2 4.1,-10.2 4.1,-1.9 4.1,0.4 5.9,0.4 5.9,-1.9 5.9,-10.2 9.1,-10.2 9.1,-1.9 9.1,0.4 10.9,0.4 10.9,-1.9 10.9,-10.2 13.25,-10.2 13.25,-7.4 14.25,-7.4 20.4,-7.4 20.4,-14.8 14.25,-14.8 14.25,-17 ; -4.25,-17 -5.75,-17 ccw(c-5.75,-17.5) -6.25,-17.5 -6.25,-30 ccw(c-5.75,-30) -5.75,-30.5 5.75,-30.5 9.25,-30.5 15.75,-30.5 ccw(c15.75,-30) 16.25,-30 16.25,-17.5 ccw(c15.75,-17.5) 16.212,-17.309 ccw(c15.75,-17.5) 15.75,-17 14.25,-17
Top Courtyard:
  lines w0.025: -6.5,-14.5 16.25,-14.5
  lines w0.05: -11,-14.1 -11,-7.5 -1.25,-7.5 -1.3,1.3 11.2,1.3 11.25,-7.5 21,-7.5 21,-14.1 16.5,-14.1 16.5,-31.35 -6.5,-31.35 -6.5,-14.1 -11,-14.1
Bottom Courtyard:
  circle w0.05: c17.5,-10.8 r3.7
  circle w0.05: c-7.5,-10.8 r3.7
Top Component Outline:
  lines w0.05: -10.75,-13.85 -6.25,-13.85 -6.25,-31.1 16.25,-31.1 16.25,-13.85 20.75,-13.85 20.75,-7.75 -10.75,-7.75 -10.75,-13.85
Top Component Terminal:
  lines w0.025: -0.4,-7.4 0.4,-7.4 ; -0.4,-7.4 -0.4,-6.6 ; -0.4,-7.4 0.4,-7.4 ; -0.4,-7.4 -0.4,-6.6 ; -0.4,-6.6 0.4,-6.6 ; -0.4,-6.6 0.4,-6.6 ; -0.4,-3.9 0.4,-3.9 ; -0.4,-3.9 -0.4,-3.1 ; -0.4,-3.9 0.4,-3.9 ; -0.4,-3.9 -0.4,-3.1 ; -0.4,-3.1 0.4,-3.1 ; -0.4,-3.1 0.4,-3.1 ; -0.4,-0.4 0.4,-0.4 ; -0.4,-0.4 -0.4,0.4 ; -0.4,-0.4 0.4,-0.4 ; -0.4,-0.4 -0.4,0.4 ; -0.4,-0.4 0.4,-0.4 ; -0.4,-0.4 -0.4,0.4 ; -0.4,-0.4 0.4,-0.4 ; -0.4,-0.4 -0.4,0.4 ; -0.4,0.4 0.4,0.4 ; -0.4,0.4 0.4,0.4 ; -0.4,0.4 0.4,0.4 ; -0.4,0.4 0.4,0.4 ; 0.4,-7.4 0.4,-6.6 ; 0.4,-7.4 0.4,-6.6 ; 0.4,-3.9 0.4,-3.1 ; 0.4,-3.9 0.4,-3.1 ; 0.4,-0.4 0.4,0.4 ; 0.4,-0.4 0.4,0.4 ; 0.4,-0.4 0.4,0.4 ; 0.4,-0.4 0.4,0.4 ; 4.6,-0.4 5.4,-0.4 ; 4.6,-0.4 4.6,0.4 ; 4.6,-0.4 5.4,-0.4 ; 4.6,-0.4 4.6,0.4 ; 4.6,0.4 5.4,0.4 ; 4.6,0.4 5.4,0.4 ; 5.4,-0.4 5.4,0.4 ; 5.4,-0.4 5.4,0.4 ; 9.6,-0.4 10.4,-0.4 ; 9.6,-0.4 9.6,0.4 ; 9.6,-0.4 10.4,-0.4 ; 9.6,-0.4 9.6,0.4 ; 9.6,0.4 10.4,0.4 ; 9.6,0.4 10.4,0.4 ; 10.4,-0.4 10.4,0.4 ; 10.4,-0.4 10.4,0.4 ; 4.6,-7.4 5.4,-7.4 5.4,-6.6 4.6,-6.6 4.6,-7.4 ; 4.6,-3.9 5.4,-3.9 5.4,-3.1 4.6,-3.1 4.6,-3.9 ; 9.6,-7.4 10.4,-7.4 10.4,-6.6 9.6,-6.6 9.6,-7.4 ; 9.6,-3.9 10.4,-3.9 10.4,-3.1 9.6,-3.1 9.6,-3.9
3D body "TE_966140-4.stp": height 25.7, standoff -3, extent -10.45,-30.5 20.4,0.4

## TE_966140-5 [mm] "Conn Timer Connector HDR 6 POS 5mm Solder RA Thru-Hole 6 Terminal 1 Port Tray"
height 25.7
pads (8):
  rrect50% 2x2 hole 1.3: 1(0,0)
  round 2 hole 1.3: 2(0,-3.5) 3(0,-7) 4(5,0) 5(5,-3.5) 6(5,-7)
  round 0 hole 3.4 unplated mask+0.25: MH1(-7.5,-10.8) MH2(12.5,-10.8)
Bottom Layer:
  pour cut-out: -11,-10.8 -11,-11.029 -10.94,-11.484 -10.821,-11.927 -10.646,-12.351 -10.416,-12.749 -10.137,-13.113 -9.813,-13.437 -9.449,-13.716 -9.051,-13.946 -8.627,-14.121 -8.184,-14.24 -7.729,-14.3 -7.5,-14.3 -7.271,-14.3 -6.816,-14.24 -6.373,-14.121 -5.949,-13.946 -5.551,-13.716 -5.187,-13.437 -4.863,-13.113 -4.584,-12.749 -4.354,-12.351 -4.179,-11.927 -4.06,-11.484 -4,-11.029 -4,-10.8 -4,-10.571 -4.06,-10.116 -4.179,-9.673 -4.354,-9.249 -4.584,-8.851 -4.863,-8.487 -5.187,-8.163 -5.551,-7.884 -5.949,-7.654 -6.373,-7.479 -6.816,-7.36 -7.271,-7.3 -7.5,-7.3 -7.729,-7.3 -8.184,-7.36 -8.627,-7.479 -9.051,-7.654 -9.449,-7.884 -9.813,-8.163 -10.137,-8.487 -10.416,-8.851 -10.646,-9.249 -10.821,-9.673 -10.94,-10.116 -11,-10.571
  pour cut-out: 9,-10.8 9,-11.029 9.06,-11.484 9.179,-11.927 9.354,-12.351 9.584,-12.749 9.863,-13.113 10.187,-13.437 10.551,-13.716 10.949,-13.946 11.373,-14.121 11.816,-14.24 12.271,-14.3 12.5,-14.3 12.729,-14.3 13.184,-14.24 13.627,-14.121 14.051,-13.946 14.449,-13.716 14.813,-13.437 15.137,-13.113 15.416,-12.749 15.646,-12.351 15.821,-11.927 15.94,-11.484 16,-11.029 16,-10.8 16,-10.571 15.94,-10.116 15.821,-9.673 15.646,-9.249 15.416,-8.851 15.137,-8.487 14.813,-8.163 14.449,-7.884 14.051,-7.654 13.627,-7.479 13.184,-7.36 12.729,-7.3 12.5,-7.3 12.271,-7.3 11.816,-7.36 11.373,-7.479 10.949,-7.654 10.551,-7.884 10.187,-8.163 9.863,-8.487 9.584,-8.851 9.354,-9.249 9.179,-9.673 9.06,-10.116 9,-10.571
Bottom Layer keep-out:
  circle w0.025: c-7.5,-10.8 r3.5
  circle w0.025: c12.5,-10.8 r3.5
Top Overlay:
  circle w0.5: c0,1.8 r0.25
Top Designator:
  text ".Designator" at -4.511,-0.453 h2
Top Assembly:
  circle w0.35: c-7.5,-10.8 r1.6
  circle w0.35: c12.5,-10.8 r1.6
  lines w0.35: -4.25,-17 -5.75,-17 ccw(c-5.75,-17.5) -6.247,-17.449 ccw(c-5.75,-17.5) -6.25,-17.5 -6.25,-30 ccw(c-5.75,-30) -5.75,-30.5 -4.25,-30.5 9.25,-30.5 10.75,-30.5 ccw(c10.75,-30) 11.25,-30 11.25,-17.5 ccw(c10.75,-17.5) 10.75,-17 9.25,-17 ; -4.25,-17 9.25,-17 ; -4.25,-17 -4.25,-13.75 -7.5,-13.75 cw(c-7.5,-10.8) -8.615,-13.531 cw(c-7.5,-10.8) -8.615,-8.069 cw(c-7.5,-10.8) -7.5,-7.85 -4.25,-7.85 -3.25,-7.85 -3.25,-10.2 -0.9,-10.2 -0.9,-1.9 -0.9,0.4 0.9,0.4 0.9,-1.9 0.9,-10.2 4.1,-10.2 4.1,-1.9 4.1,0.4 5.9,0.4 5.9,-1.9 5.9,-10.2 8.25,-10.2 8.25,-7.4 9.25,-7.4 15.4,-7.4 15.4,-14.8 9.25,-14.8 9.25,-17
Top Courtyard:
  lines w0.025: -6.5,-14.5 11.25,-14.5
  lines w0.05: -11,-14.1 -6.5,-14.1 -6.5,-31.35 11.5,-31.35 11.5,-14.1 16,-14.1 16,-7.5 6.25,-7.5 6.3,1.3 -1.3,1.3 -1.25,-7.5 -11,-7.5 -11,-14.1
Bottom Courtyard:
  circle w0.05: c-7.5,-10.8 r3.7
  circle w0.05: c12.5,-10.8 r3.7
Top Component Outline:
  lines w0.05: -10.75,-13.85 -10.75,-7.75 15.75,-7.75 15.75,-13.85 11.25,-13.85 11.25,-31.1 -6.25,-31.1 -6.25,-13.85 -10.75,-13.85
Top Component Terminal:
  lines w0.025: -0.4,-7.4 -0.4,-6.6 ; -0.4,-7.4 0.4,-7.4 ; -0.4,-7.4 -0.4,-6.6 ; -0.4,-7.4 0.4,-7.4 ; -0.4,-6.6 0.4,-6.6 ; -0.4,-6.6 0.4,-6.6 ; -0.4,-3.9 -0.4,-3.1 ; -0.4,-3.9 0.4,-3.9 ; -0.4,-3.9 -0.4,-3.1 ; -0.4,-3.9 0.4,-3.9 ; -0.4,-3.1 0.4,-3.1 ; -0.4,-3.1 0.4,-3.1 ; -0.4,-0.4 -0.4,0.4 ; -0.4,-0.4 0.4,-0.4 ; -0.4,-0.4 -0.4,0.4 ; -0.4,-0.4 0.4,-0.4 ; -0.4,-0.4 -0.4,0.4 ; -0.4,-0.4 0.4,-0.4 ; -0.4,-0.4 -0.4,0.4 ; -0.4,-0.4 0.4,-0.4 ; -0.4,0.4 0.4,0.4 ; -0.4,0.4 0.4,0.4 ; -0.4,0.4 0.4,0.4 ; -0.4,0.4 0.4,0.4 ; 0.4,-7.4 0.4,-6.6 ; 0.4,-7.4 0.4,-6.6 ; 0.4,-3.9 0.4,-3.1 ; 0.4,-3.9 0.4,-3.1 ; 0.4,-0.4 0.4,0.4 ; 0.4,-0.4 0.4,0.4 ; 0.4,-0.4 0.4,0.4 ; 0.4,-0.4 0.4,0.4 ; 4.6,-0.4 4.6,0.4 ; 4.6,-0.4 5.4,-0.4 ; 4.6,-0.4 4.6,0.4 ; 4.6,-0.4 5.4,-0.4 ; 4.6,0.4 5.4,0.4 ; 4.6,0.4 5.4,0.4 ; 5.4,-0.4 5.4,0.4 ; 5.4,-0.4 5.4,0.4 ; 4.6,-7.4 4.6,-6.6 5.4,-6.6 5.4,-7.4 4.6,-7.4 ; 4.6,-3.9 4.6,-3.1 5.4,-3.1 5.4,-3.9 4.6,-3.9
3D body "TE_966140-5.stp": height 25.7, standoff -3, extent -10.45,-30.5 15.4,0.4

## TE_966140-6 [mm] "Conn Timer Connector HDR 21 POS 5mm Solder RA Thru-Hole 21 Terminal 1 Port Tray"
height 25.7
pads (23):
  rrect50% 2x2 hole 1.3: 1(0,0)
  round 2 hole 1.3: 2(0,-3.5) 3(0,-7) 4(5,0) 5(5,-3.5) 6(5,-7) 7(10,0) 8(10,-3.5) 9(10,-7) 10(15,0) 11(15,-3.5) 12(15,-7) 13(20,0) 14(20,-3.5) 15(20,-7) 16(25,0) 17(25,-3.5) 18(25,-7) 19(30,0) 20(30,-3.5) 21(30,-7)
  round 0 hole 3.4 unplated mask+0.25: MH1(-7.5,-10.8) MH2(37.5,-10.8)
Bottom Layer:
  pour cut-out: -11,-10.8 -11,-11.029 -10.94,-11.484 -10.821,-11.927 -10.646,-12.351 -10.416,-12.749 -10.137,-13.113 -9.813,-13.437 -9.449,-13.716 -9.051,-13.946 -8.627,-14.121 -8.184,-14.24 -7.729,-14.3 -7.5,-14.3 -7.271,-14.3 -6.816,-14.24 -6.373,-14.121 -5.949,-13.946 -5.551,-13.716 -5.187,-13.437 -4.863,-13.113 -4.584,-12.749 -4.354,-12.351 -4.179,-11.927 -4.06,-11.484 -4,-11.029 -4,-10.8 -4,-10.571 -4.06,-10.116 -4.179,-9.673 -4.354,-9.249 -4.584,-8.851 -4.863,-8.487 -5.187,-8.163 -5.551,-7.884 -5.949,-7.654 -6.373,-7.479 -6.816,-7.36 -7.271,-7.3 -7.5,-7.3 -7.729,-7.3 -8.184,-7.36 -8.627,-7.479 -9.051,-7.654 -9.449,-7.884 -9.813,-8.163 -10.137,-8.487 -10.416,-8.851 -10.646,-9.249 -10.821,-9.673 -10.94,-10.116 -11,-10.571
  pour cut-out: 34,-10.8 34,-11.029 34.06,-11.484 34.179,-11.927 34.354,-12.351 34.584,-12.749 34.863,-13.113 35.187,-13.437 35.551,-13.716 35.949,-13.946 36.373,-14.121 36.816,-14.24 37.271,-14.3 37.5,-14.3 37.729,-14.3 38.184,-14.24 38.627,-14.121 39.051,-13.946 39.449,-13.716 39.813,-13.437 40.137,-13.113 40.416,-12.749 40.646,-12.351 40.821,-11.927 40.94,-11.484 41,-11.029 41,-10.8 41,-10.571 40.94,-10.116 40.821,-9.673 40.646,-9.249 40.416,-8.851 40.137,-8.487 39.813,-8.163 39.449,-7.884 39.051,-7.654 38.627,-7.479 38.184,-7.36 37.729,-7.3 37.5,-7.3 37.271,-7.3 36.816,-7.36 36.373,-7.479 35.949,-7.654 35.551,-7.884 35.187,-8.163 34.863,-8.487 34.584,-8.851 34.354,-9.249 34.179,-9.673 34.06,-10.116 34,-10.571
Bottom Layer keep-out:
  circle w0.025: c-7.5,-10.8 r3.5
  circle w0.025: c37.5,-10.8 r3.5
Top Overlay:
  circle w0.5: c0,1.8 r0.25
Top Designator:
  text ".Designator" at -4.511,-0.453 h2
Top Assembly:
  circle w0.35: c37.5,-10.8 r1.6
  circle w0.35: c-7.5,-10.8 r1.6
  lines w0.35: -4.25,-17 -4.25,-13.75 -7.5,-13.75 cw(c-7.5,-10.8) -8.615,-13.531 cw(c-7.5,-10.8) -8.615,-8.069 cw(c-7.5,-10.8) -7.5,-7.85 -4.25,-7.85 -3.25,-7.85 -3.25,-10.2 -0.9,-10.2 -0.9,-1.9 -0.9,0.4 0.9,0.4 0.9,-1.9 0.9,-10.2 4.1,-10.2 4.1,-1.9 4.1,0.4 5.9,0.4 5.9,-1.9 5.9,-10.2 9.1,-10.2 9.1,-1.9 9.1,0.4 10.9,0.4 10.9,-1.9 10.9,-10.2 14.1,-10.2 14.1,-1.9 14.1,0.4 15.9,0.4 15.9,-1.9 15.9,-10.2 19.1,-10.2 19.1,-1.9 19.1,0.4 20.9,0.4 20.9,-1.9 20.9,-10.2 24.1,-10.2 24.1,-1.9 24.1,0.4 25.9,0.4 25.9,-1.9 25.9,-10.2 29.1,-10.2 29.1,-1.9 29.1,0.4 30.9,0.4 30.9,-1.9 30.9,-10.2 33.25,-10.2 33.25,-7.4 34.25,-7.4 40.4,-7.4 40.4,-14.8 34.25,-14.8 34.25,-17 ; -4.25,-17 -5.75,-17 ccw(c-5.75,-17.5) -6.25,-17.5 -6.25,-30 ccw(c-5.75,-30) -5.75,-30.5 8.25,-30.5 21.75,-30.5 35.75,-30.5 ccw(c35.75,-30) 36.25,-30 36.25,-17.5 ccw(c35.75,-17.5) 35.75,-17 34.25,-17 ; -4.25,-17 34.25,-17
Top Courtyard:
  lines w0.025: -6.5,-14.5 36.5,-14.5
  lines w0.05: -11,-14.1 -11,-7.5 -1.25,-7.5 -1.3,1.3 31.2,1.3 31.25,-7.5 41,-7.5 41,-14.1 36.5,-14.1 36.5,-31.35 -6.5,-31.35 -6.5,-14.1 -11,-14.1
Bottom Courtyard:
  circle w0.05: c-7.5,-10.8 r3.7
  circle w0.05: c37.5,-10.8 r3.7
Top Component Outline:
  lines w0.05: -10.75,-13.85 -6.25,-13.85 -6.25,-31.1 36.25,-31.1 36.25,-13.85 40.75,-13.85 40.75,-7.75 -10.75,-7.75 -10.75,-13.85
Top Component Terminal:
  lines w0.025: -0.4,-7.4 0.4,-7.4 ; -0.4,-7.4 -0.4,-6.6 ; -0.4,-7.4 0.4,-7.4 ; -0.4,-7.4 -0.4,-6.6 ; -0.4,-6.6 0.4,-6.6 ; -0.4,-6.6 0.4,-6.6 ; -0.4,-3.9 0.4,-3.9 ; -0.4,-3.9 -0.4,-3.1 ; -0.4,-3.9 0.4,-3.9 ; -0.4,-3.9 -0.4,-3.1 ; -0.4,-3.1 0.4,-3.1 ; -0.4,-3.1 0.4,-3.1 ; -0.4,-0.4 0.4,-0.4 ; -0.4,-0.4 -0.4,0.4 ; -0.4,-0.4 0.4,-0.4 ; -0.4,-0.4 -0.4,0.4 ; -0.4,-0.4 0.4,-0.4 ; -0.4,-0.4 -0.4,0.4 ; -0.4,-0.4 0.4,-0.4 ; -0.4,-0.4 -0.4,0.4 ; -0.4,0.4 0.4,0.4 ; -0.4,0.4 0.4,0.4 ; -0.4,0.4 0.4,0.4 ; -0.4,0.4 0.4,0.4 ; 0.4,-7.4 0.4,-6.6 ; 0.4,-7.4 0.4,-6.6 ; 0.4,-3.9 0.4,-3.1 ; 0.4,-3.9 0.4,-3.1 ; 0.4,-0.4 0.4,0.4 ; 0.4,-0.4 0.4,0.4 ; 0.4,-0.4 0.4,0.4 ; 0.4,-0.4 0.4,0.4 ; 4.6,-0.4 5.4,-0.4 ; 4.6,-0.4 4.6,0.4 ; 4.6,-0.4 5.4,-0.4 ; 4.6,-0.4 4.6,0.4 ; 4.6,0.4 5.4,0.4 ; 4.6,0.4 5.4,0.4 ; 5.4,-0.4 5.4,0.4 ; 5.4,-0.4 5.4,0.4 ; 9.6,-0.4 10.4,-0.4 ; 9.6,-0.4 9.6,0.4 ; 9.6,-0.4 10.4,-0.4 ; 9.6,-0.4 9.6,0.4 ; 9.6,0.4 10.4,0.4 ; 9.6,0.4 10.4,0.4 ; 10.4,-0.4 10.4,0.4 ; 10.4,-0.4 10.4,0.4 ; 14.6,-0.4 15.4,-0.4 ; 14.6,-0.4 14.6,0.4 ; 14.6,-0.4 15.4,-0.4 ; 14.6,-0.4 14.6,0.4 ; 14.6,0.4 15.4,0.4 ; 14.6,0.4 15.4,0.4 ; 15.4,-0.4 15.4,0.4 ; 15.4,-0.4 15.4,0.4 ; 19.6,-0.4 20.4,-0.4 ; 19.6,-0.4 19.6,0.4 ; 19.6,-0.4 20.4,-0.4 ; 19.6,-0.4 19.6,0.4 ; 19.6,0.4 20.4,0.4 ; 19.6,0.4 20.4,0.4 ; 20.4,-0.4 20.4,0.4 ; 20.4,-0.4 20.4,0.4 ; 24.6,-0.4 25.4,-0.4 ; 24.6,-0.4 24.6,0.4 ; 24.6,-0.4 25.4,-0.4 ; 24.6,-0.4 24.6,0.4 ; 24.6,0.4 25.4,0.4 ; 24.6,0.4 25.4,0.4 ; 25.4,-0.4 25.4,0.4 ; 25.4,-0.4 25.4,0.4 ; 4.6,-7.4 5.4,-7.4 5.4,-6.6 4.6,-6.6 4.6,-7.4 ; 4.6,-3.9 5.4,-3.9 5.4,-3.1 4.6,-3.1 4.6,-3.9 ; 9.6,-7.4 10.4,-7.4 10.4,-6.6 9.6,-6.6 9.6,-7.4 ; 9.6,-3.9 10.4,-3.9 10.4,-3.1 9.6,-3.1 9.6,-3.9 ; 14.6,-7.4 15.4,-7.4 15.4,-6.6 14.6,-6.6 14.6,-7.4 ; 14.6,-3.9 15.4,-3.9 15.4,-3.1 14.6,-3.1 14.6,-3.9 ; 19.6,-7.4 20.4,-7.4 20.4,-6.6 19.6,-6.6 19.6,-7.4 ; 19.6,-3.9 20.4,-3.9 20.4,-3.1 19.6,-3.1 19.6,-3.9 ; 24.6,-7.4 25.4,-7.4 25.4,-6.6 24.6,-6.6 24.6,-7.4 ; 24.6,-3.9 25.4,-3.9 25.4,-3.1 24.6,-3.1 24.6,-3.9
3D body "TE_966140-6.stp": height 25.7, standoff -3, extent -10.45,-30.5 40.4,0.4

## THRMSBO510W51L1020T300H1570 [mm]
height 15.7
pads (2):
  rrect50% 1.3x1.3 hole 0.8: 1(-2.55,0.45)
  round 1.3 hole 0.8: 2(2.55,-0.45)
Top Overlay:
  lines w0.2: -4.2,0.805 -5.2,0.805 -5.2,-0.805 -3.2,-0.805 ; 3.2,0.805 5.2,0.805 5.2,-0.805 4.2,-0.805
Top Assembly:
  lines w0.35: -5.1,-0.705 -5.1,0.705 5.1,0.705 5.1,-0.705 -5.1,-0.705
Top Courtyard:
  lines w0.05: -0.35,0 0.35,0 ; 0,-0.35 0,0.35 ; -5.4,-1.005 1.65,-1.005 1.65,-1.35 5.4,-1.35 5.4,1.005 -1.65,1.005 -1.65,1.35 -5.4,1.35 -5.4,-1.005
Top Component Outline:
  lines w0.025: -5.1,-0.705 -5.1,0.705 5.1,0.705 5.1,-0.705 -5.1,-0.705
Top Component Terminal:
  circle w0.025: c-2.55,0.45 r0.255
  circle w0.025: c2.55,-0.45 r0.255
3D body "RUEF185.stp": height 13.5, standoff -3.2, extent -5.1,-0.705 5.1,0.705